# Altium schematic symbol library FE_Channel.SchLib: 46 symbols
Pins are listed as number, name and electrical type; pins without a type are passive.

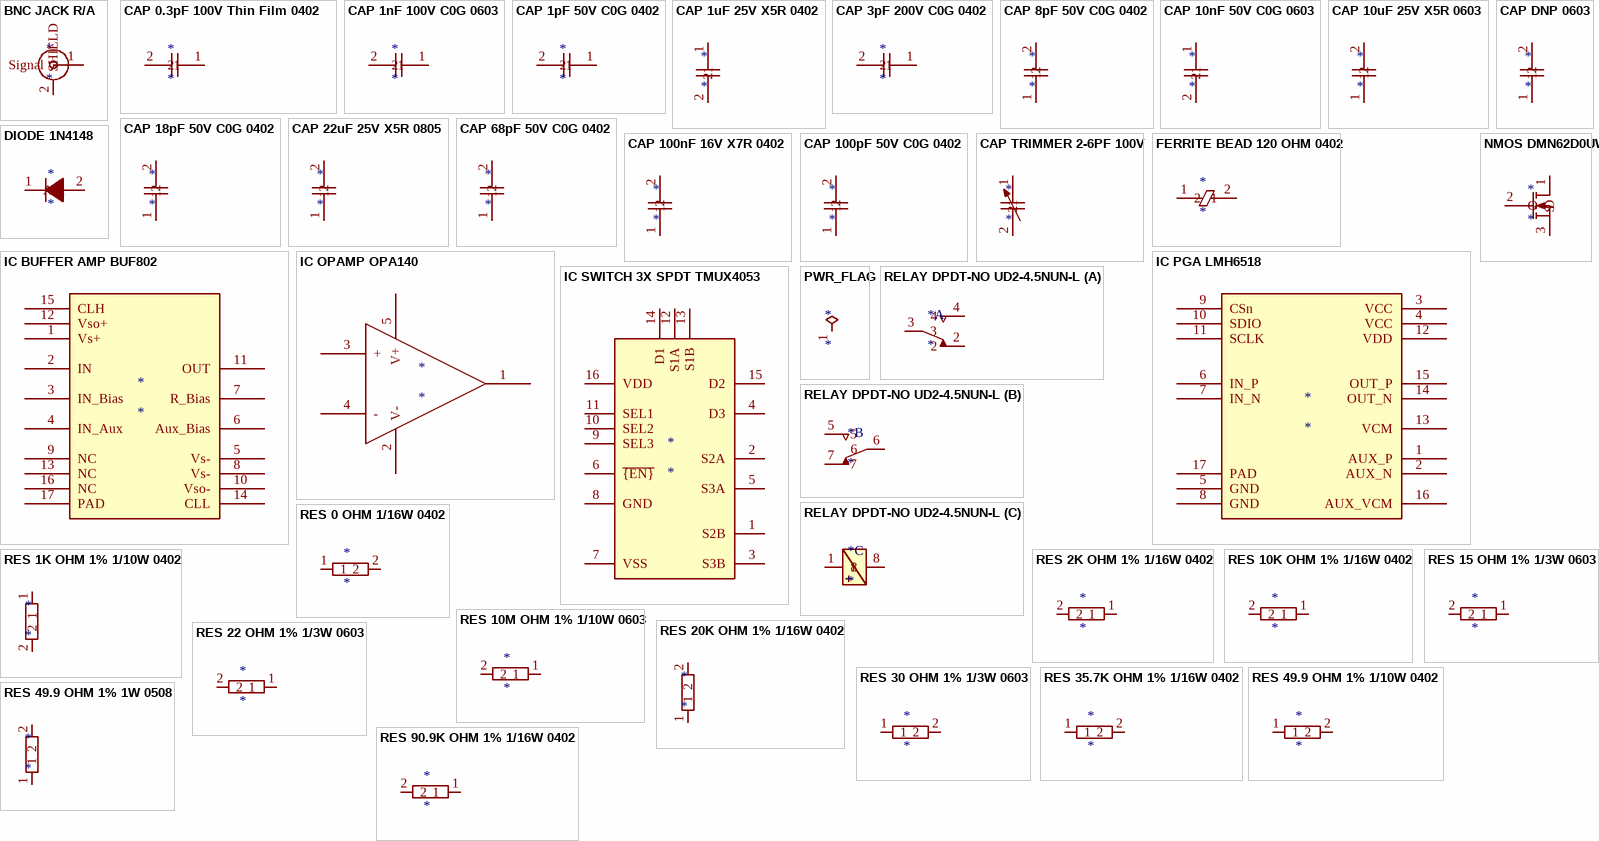
[diagram p0: symbols BNC JACK R/A to RES 90.9K OHM 1% 1/16W 0402]

## BNC JACK R/A
designator *
pins: 1 Signal, 2 SHIELD

## CAP 0.3pF 100V Thin Film 0402
designator *
pins: 1, 2

## CAP 1nF 100V C0G 0603
designator *
pins: 1, 2

## CAP 1pF 50V C0G 0402
designator *
pins: 1, 2

## CAP 1uF 25V X5R 0402
designator *
pins: 1, 2

## CAP 3pF 200V C0G 0402
designator *
pins: 1, 2

## CAP 8pF 50V C0G 0402
designator *
pins: 1, 2

## CAP 10nF 50V C0G 0603
designator *
pins: 1, 2

## CAP 10uF 25V X5R 0603
designator *
pins: 1, 2

## CAP 18pF 50V C0G 0402
designator *
pins: 1, 2

## CAP 22uF 25V X5R 0805
designator *
pins: 1, 2

## CAP 68pF 50V C0G 0402
designator *
pins: 1, 2

## CAP 100nF 16V X7R 0402
designator *
pins: 1, 2

## CAP 100pF 50V C0G 0402
designator *
pins: 1, 2

## CAP DNP 0603
designator *
pins: 1, 2

## CAP TRIMMER 2-6PF 100V
designator *
pins: 1, 2

## DIODE 1N4148
designator *
pins: 1 K, 2 A

## FERRITE BEAD 120 OHM 0402
designator *
pins: 1, 2

## IC BUFFER AMP BUF802
designator *
pins: 1 Vs+, 2 IN, 3 IN_Bias, 4 IN_Aux, 5 Vs-, 6 Aux_Bias, 7 R_Bias, 8 Vs-, 9 NC, 10 Vso-, 11 OUT, 12 Vso+, 13 NC, 14 CLL, 15 CLH, 16 NC, 17 PAD

## IC OPAMP OPA140
designator *
pins: 1 OUT, 2 V-, 3 +, 4 -, 5 V+

## IC PGA LMH6518
designator *
pins: 1 AUX_P, 2 AUX_N, 3 VCC, 4 VCC, 5 GND, 6 IN_P, 7 IN_N, 8 GND, 9 CSn, 10 SDIO, 11 SCLK, 12 VDD, 13 VCM, 14 OUT_N, 15 OUT_P, 16 AUX_VCM, 17 PAD

## IC SWITCH 3X SPDT TMUX4053
designator *
pins: 1 S2B, 2 S2A, 3 S3B, 4 D3, 5 S3A, 6 ~{{EN}}, 7 VSS, 8 GND, 9 SEL3, 10 SEL2, 11 SEL1, 12 S1A, 13 S1B, 14 D1, 15 D2, 16 VDD

## NMOS DMN62D0UW
designator *
pins: 1 D, 2 G, 3 S

## PWR_FLAG
designator *  (graphical)
pins: 1

## RELAY DPDT-NO UD2-4.5NUN-L
designator *
part A pins: 2, 3, 4
part B pins: 5, 6, 7
part C pins: 1, 8

## RES 0 OHM 1/16W 0402
designator *
pins: 1, 2

## RES 1K OHM 1% 1/10W 0402
designator *
pins: 1, 2

## RES 2K OHM 1% 1/16W 0402
designator *
pins: 1, 2

## RES 10K OHM 1% 1/16W 0402
designator *
pins: 1, 2

## RES 10M OHM 1% 1/10W 0603
designator *
pins: 1, 2

## RES 15 OHM 1% 1/3W 0603
designator *
pins: 1, 2

## RES 20K OHM 1% 1/16W 0402
designator *
pins: 1, 2

## RES 22 OHM 1% 1/3W 0603
designator *
pins: 1, 2

## RES 30 OHM 1% 1/3W 0603
designator *
pins: 1, 2

## RES 35.7K OHM 1% 1/16W 0402
designator *
pins: 1, 2

## RES 49.9 OHM 1% 1/10W 0402
designator *
pins: 1, 2

## RES 49.9 OHM 1% 1W 0508
designator *
pins: 1, 2

## RES 90.9K OHM 1% 1/16W 0402
designator *
pins: 1, 2

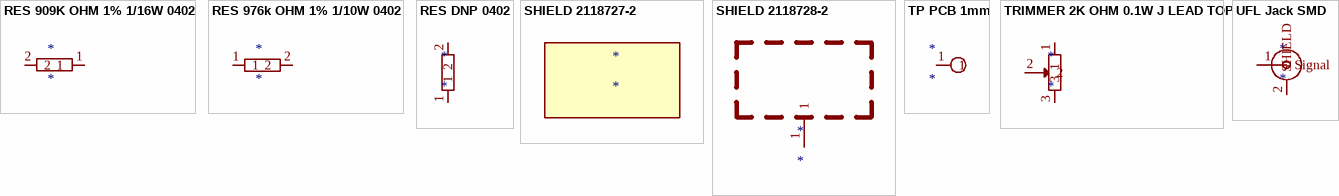
[diagram p1: symbols RES 909K OHM 1% 1/16W 0402 to UFL Jack SMD]

## RES 909K OHM 1% 1/16W 0402
designator *
pins: 1, 2

## RES 976k OHM 1% 1/10W 0402
designator *
pins: 1, 2

## RES DNP 0402
designator *
pins: 1, 2

## SHIELD 2118727-2
designator *

## SHIELD 2118728-2
designator *
pins: 1

## TP PCB 1mm
designator *
pins: 1

## TRIMMER 2K OHM 0.1W J LEAD TOP
designator *
pins: 1, 2, 3

## UFL Jack SMD
designator *
pins: 1 Signal, 2 SHIELD